# Altium footprint library WR-PHD_Socket Header_2.00mm.PcbLib: 62 footprints (part 2 of 4)
Each footprint in its own frame and in the unit in brackets; x right, y up, seen from the top. Pads: shape width x height; smd on the part's side, far side on the other; paste and mask are expansions set on the pad; w line width, h text height; cw(c..) or ccw(c..) is an arc to the next point about the centre after c.
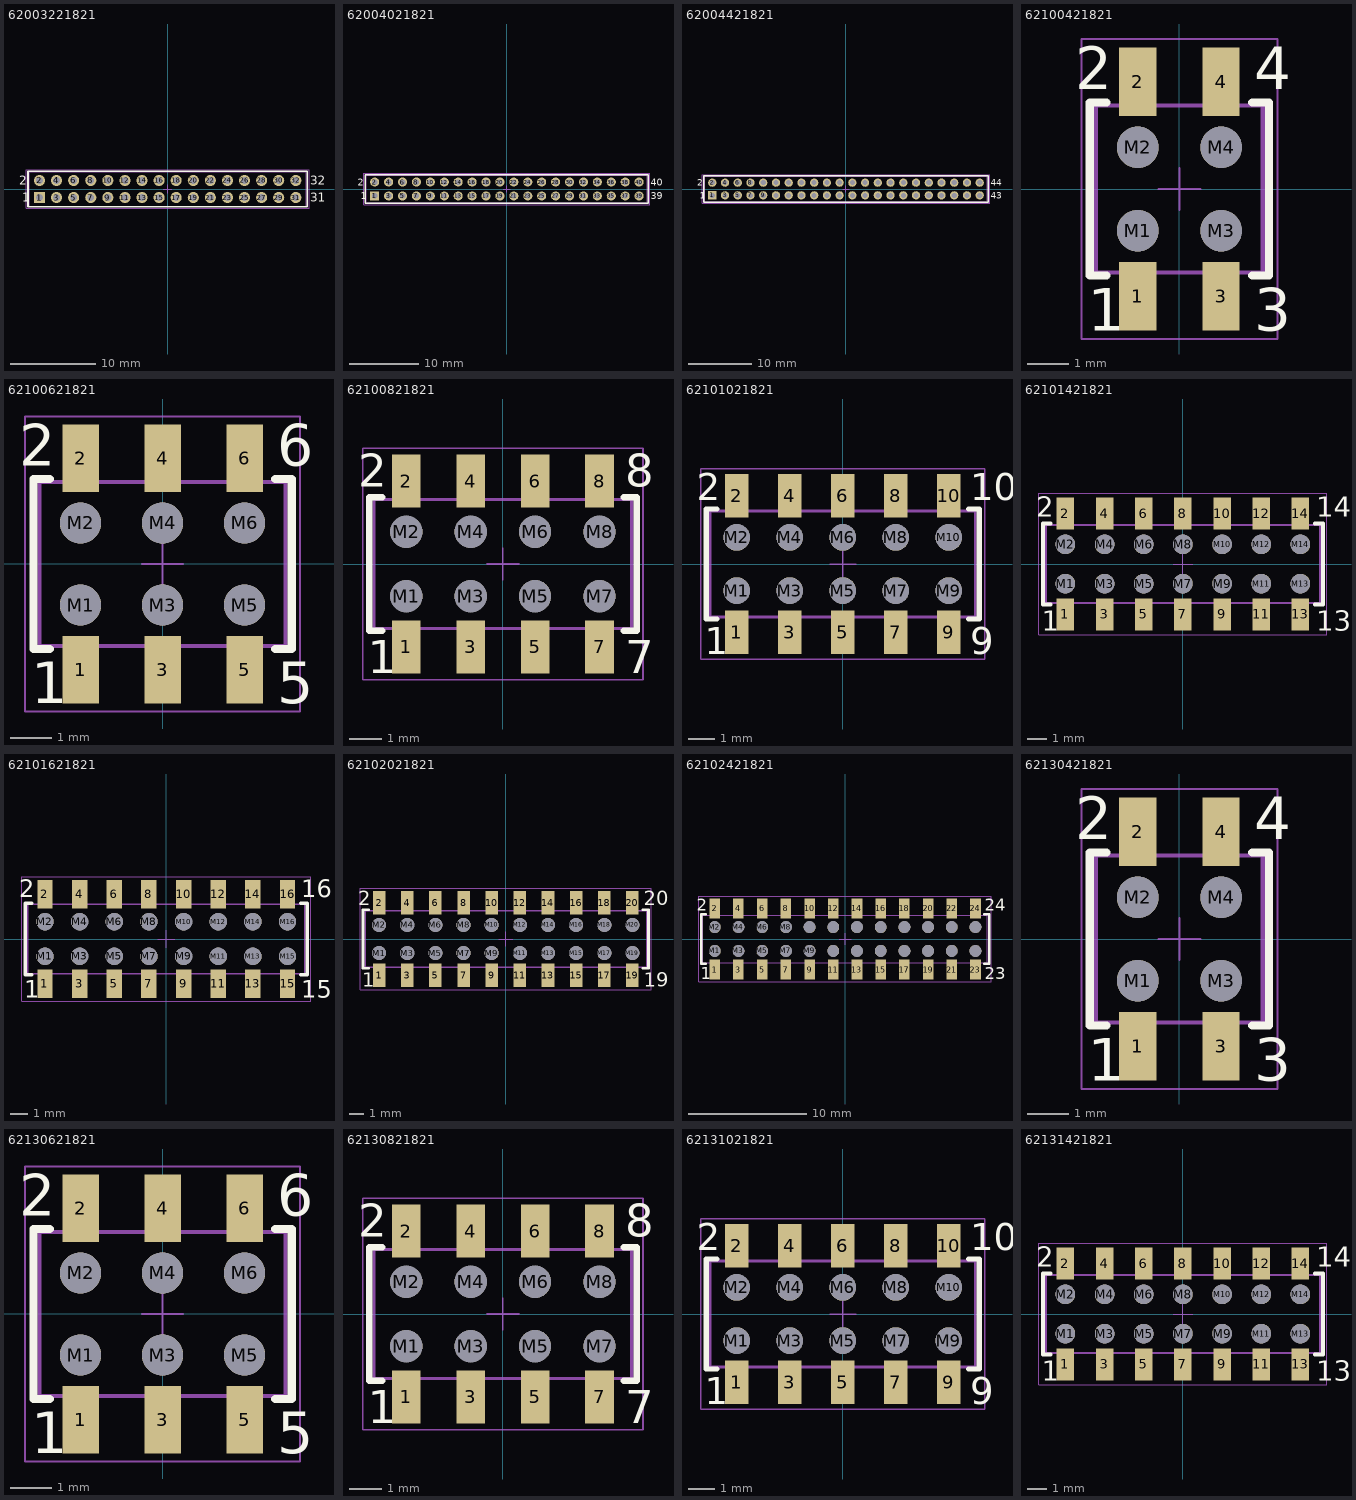
[diagram p1: the footprints below, top view; thin cyan lines are the x and y axes]

## 62003221821 [mm] "Socket Header, Pitch 2.00 mm, THT, Vertical, dual row, 32p"
height 4.45
pads (32):
  rect 1.3x1.3 hole 0.8: 1(-15,-1)
  round 1.3 hole 0.8: 2(-15,1) 3(-13,-1) 4(-13,1) 5(-11,-1) 6(-11,1) 7(-9,-1) 8(-9,1) 9(-7,-1) 10(-7,1) 11(-5,-1) 12(-5,1) 13(-3,-1) 14(-3,1) 15(-1,-1) 16(-1,1) 17(1,-1) 18(1,1) 19(3,-1) 20(3,1) 21(5,-1) 22(5,1) 23(7,-1) 24(7,1) 25(9,-1) 26(9,1) 27(11,-1) 28(11,1) 29(13,-1) 30(13,1) 31(15,-1) 32(15,1)
Top Overlay:
  lines w0.2: -16.35,-2.075 16.35,-2.075 16.35,2.075 -16.35,2.075 -16.35,-2.075
  text "32" at 16.7,0.5 h1.02
  text "31" at 16.7,-1.5 h1.02
  text "2" at -17.4,0.5 h1.02
  text "1" at -17,-1.5 h1.02
Mechanical 13:
  lines w0.1: -16.2,-2 16.2,-2 16.2,2 -16.2,2 -16.2,-2
Mechanical 15:
  lines w0.05: -0.5,0 0.5,0 ; 0,-0.5 0,0.5 ; -16.55,-2.275 16.55,-2.275 16.55,2.275 -16.55,2.275 -16.55,-2.275
3D body "62003221821.stp": height 4.35, standoff -2.65, extent -16.3,-2 16.3,2

## 62004021821 [mm] "Socket Header, Pitch 2.00 mm, THT, Vertical, dual row, 40p"
height 4.45
pads (40):
  rect 1.3x1.3 hole 0.8: 1(-19,-1)
  round 1.3 hole 0.8: 2(-19,1) 3(-17,-1) 4(-17,1) 5(-15,-1) 6(-15,1) 7(-13,-1) 8(-13,1) 9(-11,-1) 10(-11,1) 11(-9,-1) 12(-9,1) 13(-7,-1) 14(-7,1) 15(-5,-1) 16(-5,1) 17(-3,-1) 18(-3,1) 19(-1,-1) 20(-1,1) 21(1,-1) 22(1,1) 23(3,-1) 24(3,1) 25(5,-1) 26(5,1) 27(7,-1) 28(7,1) 29(9,-1) 30(9,1) 31(11,-1) 32(11,1) 33(13,-1) 34(13,1) 35(15,-1) 36(15,1) 37(17,-1) 38(17,1) 39(19,-1) 40(19,1)
Top Overlay:
  lines w0.2: -20.35,-2.075 -20.35,2.075 20.35,2.075 20.35,-2.075 -20.35,-2.075
  text "1" at -21,-1.5 h1.02
  text "2" at -21.4,0.5 h1.02
  text "39" at 20.7,-1.5 h1.02
  text "40" at 20.7,0.5 h1.02
Mechanical 13:
  lines w0.1: -20.2,-2 -20.2,2 20.2,2 20.2,-2 -20.2,-2
Mechanical 15:
  lines w0.05: -0.5,0 0.5,0 ; 0,-0.5 0,0.5 ; -20.55,-2.275 -20.55,2.275 20.55,2.275 20.55,-2.275 -20.55,-2.275
3D body "62004021821.stp": height 4.35, standoff -2.65, extent -20.3,-2 20.3,2

## 62004421821 [mm] "Socket Header, Pitch 2.00 mm, THT, Vertical, dual row, 44p"
height 4.45
pads (44):
  rect 1.3x1.3 hole 0.8: 1(-21,-1)
  round 1.3 hole 0.8: 2(-21,1) 3(-19,-1) 4(-19,1) 5(-17,-1) 6(-17,1) 7(-15,-1) 8(-15,1) 9(-13,-1) 10(-13,1) 11(-11,-1) 12(-11,1) 13(-9,-1) 14(-9,1) 15(-7,-1) 16(-7,1) 17(-5,-1) 18(-5,1) 19(-3,-1) 20(-3,1) 21(-1,-1) 22(-1,1) 23(1,-1) 24(1,1) 25(3,-1) 26(3,1) 27(5,-1) 28(5,1) 29(7,-1) 30(7,1) 31(9,-1) 32(9,1) 33(11,-1) 34(11,1) 35(13,-1) 36(13,1) 37(15,-1) 38(15,1) 39(17,-1) 40(17,1) 41(19,-1) 42(19,1) 43(21,-1) 44(21,1)
Top Overlay:
  lines w0.2: -22.35,-2.075 22.35,-2.075 22.35,2.075 -22.35,2.075 -22.35,-2.075
  text "2" at -23.4,0.5 h1.02
  text "1" at -23,-1.5 h1.02
  text "43" at 22.7,-1.5 h1.02
  text "44" at 22.7,0.5 h1.02
Mechanical 13:
  lines w0.1: -22.2,-2 22.2,-2 22.2,2 -22.2,2 -22.2,-2
Mechanical 15:
  lines w0.05: -0.5,0 0.5,0 ; 0,-0.5 0,0.5 ; -22.55,-2.275 22.55,-2.275 22.55,2.275 -22.55,2.275 -22.55,-2.275
3D body "62004421821.stp": height 4.35, standoff -2.65, extent -22.3,-2 22.3,2

## 62100421821 [mm] "Socket Header, Pitch 2.00 mm, SMT, Vertical, dual row, 4p"
height 2.35
pads (8):
  rect 0.89x1.65 smd: 1(-1,-2.575) 2(-1,2.575) 3(1,-2.575) 4(1,2.575)
  round 1 hole 1 unplated: M1(-1,-1) M2(-1,1) M3(1,-1) M4(1,1)
Top Overlay:
  lines w0.2: -1.75,-2.075 -2.15,-2.075 -2.15,2.075 -1.75,2.075 ; 1.75,-2.075 2.15,-2.075 2.15,2.075 1.75,2.075
  text "2" at -2.5,2.4 h1.02
  text "4" at 1.8,2.4 h1.02
  text "3" at 1.8,-3.4 h1.02
  text "1" at -2.2,-3.4 h1.02
Mechanical 13:
  lines w0.1: -1.25,-2 -1.25,-3 -0.75,-3 -0.75,-2 ; -1.25,2 -1.25,3 -0.75,3 -0.75,2 ; 0.75,-2 0.75,-3 1.25,-3 1.25,-2 ; 0.75,2 0.75,3 1.25,3 1.25,2 ; -2,-2 2,-2 2,2 -2,2 -2,-2
Mechanical 15:
  lines w0.05: -0.5,0 0.5,0 ; 0,-0.5 0,0.5 ; -2.35,-3.6 -2.35,3.6 2.35,3.6 2.35,-3.6 -2.35,-3.6
3D body "62100421821.stp": height 2.1, standoff 0, extent -2,-3 2,3

## 62100621821 [mm] "Socket Header, Pitch 2.00 mm, SMT, Vertical, dual row, 6p"
height 2.35
pads (12):
  rect 0.89x1.65 smd: 1(-2,-2.575) 2(-2,2.575) 3(0,-2.575) 4(0,2.575) 5(2,-2.575) 6(2,2.575)
  round 1 hole 1 unplated: M1(-2,-1) M2(-2,1) M3(0,-1) M4(0,1) M5(2,-1) M6(2,1)
Top Overlay:
  lines w0.2: -2.75,-2.075 -3.15,-2.075 -3.15,2.075 -2.75,2.075 ; 2.75,-2.075 3.15,-2.075 3.15,2.075 2.75,2.075
  text "2" at -3.5,2.4 h1.02
  text "1" at -3.2,-3.4 h1.02
  text "6" at 2.8,2.4 h1.02
  text "5" at 2.8,-3.4 h1.02
Mechanical 13:
  lines w0.1: -2.25,-2 -2.25,-3 -1.75,-3 -1.75,-2 ; -2.25,2 -2.25,3 -1.75,3 -1.75,2 ; -0.25,-2 -0.25,-3 0.25,-3 0.25,-2 ; -0.25,2 -0.25,3 0.25,3 0.25,2 ; 1.75,-2 1.75,-3 2.25,-3 2.25,-2 ; 1.75,2 1.75,3 2.25,3 2.25,2 ; -3,-2 3,-2 3,2 -3,2 -3,-2
Mechanical 15:
  lines w0.05: -0.5,0 0.5,0 ; 0,-0.5 0,0.5 ; -3.35,-3.6 -3.35,3.6 3.35,3.6 3.35,-3.6 -3.35,-3.6
3D body "62100621821.stp": height 2.1, standoff 0, extent -3,-3 3,3

## 62100821821 [mm] "Socket Header, Pitch 2.00 mm, SMT, Vertical, dual row, 8p"
height 2.35
pads (16):
  rect 0.89x1.65 smd: 1(-3,-2.575) 2(-3,2.575) 3(-1,-2.575) 4(-1,2.575) 5(1,-2.575) 6(1,2.575) 7(3,-2.575) 8(3,2.575)
  round 1 hole 1 unplated: M1(-3,-1) M2(-3,1) M3(-1,-1) M4(-1,1) M5(1,-1) M6(1,1) M7(3,-1) M8(3,1)
Top Overlay:
  lines w0.2: -3.75,-2.075 -4.15,-2.075 -4.15,2.075 -3.75,2.075 ; 3.75,-2.075 4.15,-2.075 4.15,2.075 3.75,2.075
  text "2" at -4.5,2.4 h1.02
  text "1" at -4.2,-3.4 h1.02
  text "8" at 3.8,2.4 h1.02
  text "7" at 3.8,-3.4 h1.02
Mechanical 13:
  lines w0.1: -3.25,-2 -3.25,-3 -2.75,-3 -2.75,-2 ; -3.25,2 -3.25,3 -2.75,3 -2.75,2 ; -1.25,-2 -1.25,-3 -0.75,-3 -0.75,-2 ; -1.25,2 -1.25,3 -0.75,3 -0.75,2 ; 0.75,-2 0.75,-3 1.25,-3 1.25,-2 ; 0.75,2 0.75,3 1.25,3 1.25,2 ; 2.75,-2 2.75,-3 3.25,-3 3.25,-2 ; 2.75,2 2.75,3 3.25,3 3.25,2 ; -4,-2 4,-2 4,2 -4,2 -4,-2
Mechanical 15:
  lines w0.05: -0.5,0 0.5,0 ; 0,-0.5 0,0.5 ; -4.35,-3.6 -4.35,3.6 4.35,3.6 4.35,-3.6 -4.35,-3.6
3D body "62100821821.stp": height 2.1, standoff 0, extent -4,-3 4,3

## 62101021821 [mm] "Socket Header, Pitch 2.00 mm, SMT, Vertical, dual row, 10p"
height 2.35
pads (20):
  rect 0.89x1.65 smd: 1(-4,-2.575) 2(-4,2.575) 3(-2,-2.575) 4(-2,2.575) 5(0,-2.575) 6(0,2.575) 7(2,-2.575) 8(2,2.575) 9(4,-2.575) 10(4,2.575)
  round 1 hole 1 unplated: M1(-4,-1) M2(-4,1) M3(-2,-1) M4(-2,1) M5(0,-1) M6(0,1) M7(2,-1) M8(2,1) M9(4,-1) M10(4,1)
Top Overlay:
  lines w0.2: -4.75,-2.075 -5.15,-2.075 -5.15,2.075 -4.75,2.075 ; 4.75,-2.075 5.15,-2.075 5.15,2.075 4.75,2.075
  text "2" at -5.5,2.4 h1.02
  text "1" at -5.2,-3.4 h1.02
  text "10" at 4.8,2.4 h1.02
  text "9" at 4.8,-3.4 h1.02
Mechanical 13:
  lines w0.1: -4.25,-2 -4.25,-3 -3.75,-3 -3.75,-2 ; -4.25,2 -4.25,3 -3.75,3 -3.75,2 ; -2.25,-2 -2.25,-3 -1.75,-3 -1.75,-2 ; -2.25,2 -2.25,3 -1.75,3 -1.75,2 ; -0.25,-2 -0.25,-3 0.25,-3 0.25,-2 ; -0.25,2 -0.25,3 0.25,3 0.25,2 ; 1.75,-2 1.75,-3 2.25,-3 2.25,-2 ; 1.75,2 1.75,3 2.25,3 2.25,2 ; 3.75,-2 3.75,-3 4.25,-3 4.25,-2 ; 3.75,2 3.75,3 4.25,3 4.25,2 ; -5,-2 5,-2 5,2 -5,2 -5,-2
Mechanical 15:
  lines w0.05: -0.5,0 0.5,0 ; 0,-0.5 0,0.5 ; -5.35,-3.6 -5.35,3.6 5.35,3.6 5.35,-3.6 -5.35,-3.6
3D body "62101021821.stp": height 2.1, standoff 0, extent -5,-3 5,3

## 62101421821 [mm] "Socket Header, Pitch 2.00 mm, SMT, Vertical, dual row, 14p"
height 2.35
pads (28):
  rect 0.89x1.65 smd: 1(-6,-2.575) 2(-6,2.575) 3(-4,-2.575) 4(-4,2.575) 5(-2,-2.575) 6(-2,2.575) 7(0,-2.575) 8(0,2.575) 9(2,-2.575) 10(2,2.575) 11(4,-2.575) 12(4,2.575) 13(6,-2.575) 14(6,2.575)
  round 1 hole 1 unplated: M1(-6,-1) M2(-6,1) M3(-4,-1) M4(-4,1) M5(-2,-1) M6(-2,1) M7(0,-1) M8(0,1) M9(2,-1) M10(2,1) M11(4,-1) M12(4,1) M13(6,-1) M14(6,1)
Top Overlay:
  lines w0.2: -6.75,-2.075 -7.15,-2.075 -7.15,2.075 -6.75,2.075 ; 6.75,-2.075 7.15,-2.075 7.15,2.075 6.75,2.075
  text "13" at 6.8,-3.4 h1.02
  text "14" at 6.8,2.4 h1.02
  text "2" at -7.5,2.4 h1.02
  text "1" at -7.2,-3.4 h1.02
Mechanical 13:
  lines w0.1: -6.25,-2 -6.25,-3 -5.75,-3 -5.75,-2 ; -6.25,2 -6.25,3 -5.75,3 -5.75,2 ; -4.25,-2 -4.25,-3 -3.75,-3 -3.75,-2 ; -4.25,2 -4.25,3 -3.75,3 -3.75,2 ; -2.25,-2 -2.25,-3 -1.75,-3 -1.75,-2 ; -2.25,2 -2.25,3 -1.75,3 -1.75,2 ; -0.25,-2 -0.25,-3 0.25,-3 0.25,-2 ; -0.25,2 -0.25,3 0.25,3 0.25,2 ; 1.75,-2 1.75,-3 2.25,-3 2.25,-2 ; 1.75,2 1.75,3 2.25,3 2.25,2 ; 3.75,-2 3.75,-3 4.25,-3 4.25,-2 ; 3.75,2 3.75,3 4.25,3 4.25,2 ; 5.75,-2 5.75,-3 6.25,-3 6.25,-2 ; 5.75,2 5.75,3 6.25,3 6.25,2 ; -7,-2 7,-2 7,2 -7,2 -7,-2
Mechanical 15:
  lines w0.05: -0.5,0 0.5,0 ; 0,-0.5 0,0.5 ; -7.35,-3.6 -7.35,3.6 7.35,3.6 7.35,-3.6 -7.35,-3.6
3D body "62101421821.stp": height 2.1, standoff 0, extent -7,-3 7,3

## 62101621821 [mm] "Socket Header, Pitch 2.00 mm, SMT, Vertical, dual row, 16p"
height 2.35
pads (32):
  rect 0.89x1.65 smd: 1(-7,-2.575) 2(-7,2.575) 3(-5,-2.575) 4(-5,2.575) 5(-3,-2.575) 6(-3,2.575) 7(-1,-2.575) 8(-1,2.575) 9(1,-2.575) 10(1,2.575) 11(3,-2.575) 12(3,2.575) 13(5,-2.575) 14(5,2.575) 15(7,-2.575) 16(7,2.575)
  round 1 hole 1 unplated: M1(-7,-1) M2(-7,1) M3(-5,-1) M4(-5,1) M5(-3,-1) M6(-3,1) M7(-1,-1) M8(-1,1) M9(1,-1) M10(1,1) M11(3,-1) M12(3,1) M13(5,-1) M14(5,1) M15(7,-1) M16(7,1)
Top Overlay:
  lines w0.2: -7.75,-2.075 -8.15,-2.075 -8.15,2.075 -7.75,2.075 ; 7.75,-2.075 8.15,-2.075 8.15,2.075 7.75,2.075
  text "1" at -8.2,-3.4 h1.02
  text "2" at -8.5,2.4 h1.02
  text "16" at 7.8,2.4 h1.02
  text "15" at 7.8,-3.4 h1.02
Mechanical 13:
  lines w0.1: -7.25,-2 -7.25,-3 -6.75,-3 -6.75,-2 ; -7.25,2 -7.25,3 -6.75,3 -6.75,2 ; -5.25,-2 -5.25,-3 -4.75,-3 -4.75,-2 ; -5.25,2 -5.25,3 -4.75,3 -4.75,2 ; -3.25,-2 -3.25,-3 -2.75,-3 -2.75,-2 ; -3.25,2 -3.25,3 -2.75,3 -2.75,2 ; -1.25,-2 -1.25,-3 -0.75,-3 -0.75,-2 ; -1.25,2 -1.25,3 -0.75,3 -0.75,2 ; 0.75,-2 0.75,-3 1.25,-3 1.25,-2 ; 0.75,2 0.75,3 1.25,3 1.25,2 ; 2.75,-2 2.75,-3 3.25,-3 3.25,-2 ; 2.75,2 2.75,3 3.25,3 3.25,2 ; 4.75,-2 4.75,-3 5.25,-3 5.25,-2 ; 4.75,2 4.75,3 5.25,3 5.25,2 ; 6.75,-2 6.75,-3 7.25,-3 7.25,-2 ; 6.75,2 6.75,3 7.25,3 7.25,2 ; -8,-2 -8,2 8,2 8,-2 -8,-2
Mechanical 15:
  lines w0.05: -0.5,0 0.5,0 ; 0,-0.5 0,0.5 ; -8.35,-3.6 8.35,-3.6 8.35,3.6 -8.35,3.6 -8.35,-3.6
3D body "62101621821.stp": height 2.1, standoff 0, extent -8,-3 8,3

## 62102021821 [mm] "Socket Header, Pitch 2.00 mm, SMT, Vertical, dual row, 20p"
height 2.35
pads (40):
  rect 0.89x1.65 smd: 1(-9,-2.575) 2(-9,2.575) 3(-7,-2.575) 4(-7,2.575) 5(-5,-2.575) 6(-5,2.575) 7(-3,-2.575) 8(-3,2.575) 9(-1,-2.575) 10(-1,2.575) 11(1,-2.575) 12(1,2.575) 13(3,-2.575) 14(3,2.575) 15(5,-2.575) 16(5,2.575) 17(7,-2.575) 18(7,2.575) 19(9,-2.575) 20(9,2.575)
  round 1 hole 1 unplated: M1(-9,-1) M2(-9,1) M3(-7,-1) M4(-7,1) M5(-5,-1) M6(-5,1) M7(-3,-1) M8(-3,1) M9(-1,-1) M10(-1,1) M11(1,-1) M12(1,1) M13(3,-1) M14(3,1) M15(5,-1) M16(5,1) M17(7,-1) M18(7,1) M19(9,-1) M20(9,1)
Top Overlay:
  lines w0.2: -9.75,-2.075 -10.15,-2.075 -10.15,2.075 -9.75,2.075 ; 9.75,-2.075 10.15,-2.075 10.15,2.075 9.75,2.075
  text "2" at -10.5,2.4 h1.02
  text "1" at -10.2,-3.4 h1.02
  text "20" at 9.8,2.4 h1.02
  text "19" at 9.8,-3.4 h1.02
Mechanical 13:
  lines w0.1: -9.25,-2 -9.25,-3 -8.75,-3 -8.75,-2 ; -9.25,2 -9.25,3 -8.75,3 -8.75,2 ; -7.25,-2 -7.25,-3 -6.75,-3 -6.75,-2 ; -7.25,2 -7.25,3 -6.75,3 -6.75,2 ; -5.25,-2 -5.25,-3 -4.75,-3 -4.75,-2 ; -5.25,2 -5.25,3 -4.75,3 -4.75,2 ; -3.25,-2 -3.25,-3 -2.75,-3 -2.75,-2 ; -3.25,2 -3.25,3 -2.75,3 -2.75,2 ; -1.25,-2 -1.25,-3 -0.75,-3 -0.75,-2 ; -1.25,2 -1.25,3 -0.75,3 -0.75,2 ; 0.75,-2 0.75,-3 1.25,-3 1.25,-2 ; 0.75,2 0.75,3 1.25,3 1.25,2 ; 2.75,-2 2.75,-3 3.25,-3 3.25,-2 ; 2.75,2 2.75,3 3.25,3 3.25,2 ; 4.75,-2 4.75,-3 5.25,-3 5.25,-2 ; 4.75,2 4.75,3 5.25,3 5.25,2 ; 6.75,-2 6.75,-3 7.25,-3 7.25,-2 ; 6.75,2 6.75,3 7.25,3 7.25,2 ; 8.75,-2 8.75,-3 9.25,-3 9.25,-2 ; 8.75,2 8.75,3 9.25,3 9.25,2 ; -10,-2 10,-2 10,2 -10,2 -10,-2
Mechanical 15:
  lines w0.05: -0.5,0 0.5,0 ; 0,-0.5 0,0.5 ; -10.35,-3.6 -10.35,3.6 10.35,3.6 10.35,-3.6 -10.35,-3.6
3D body "62102021821.stp": height 2.1, standoff 0, extent -10,-3 10,3

## 62102421821 [mm] "Socket Header, Pitch 2.00 mm, SMT, Vertical, dual row, 24p"
height 2.35
pads (48):
  rect 0.89x1.65 smd: 1(-11,-2.575) 2(-11,2.575) 3(-9,-2.575) 4(-9,2.575) 5(-7,-2.575) 6(-7,2.575) 7(-5,-2.575) 8(-5,2.575) 9(-3,-2.575) 10(-3,2.575) 11(-1,-2.575) 12(-1,2.575) 13(1,-2.575) 14(1,2.575) 15(3,-2.575) 16(3,2.575) 17(5,-2.575) 18(5,2.575) 19(7,-2.575) 20(7,2.575) 21(9,-2.575) 22(9,2.575) 23(11,-2.575) 24(11,2.575)
  round 1 hole 1 unplated: M1(-11,-1) M2(-11,1) M3(-9,-1) M4(-9,1) M5(-7,-1) M6(-7,1) M7(-5,-1) M8(-5,1) M9(-3,-1) M10(-3,1) M11(-1,-1) M12(-1,1) M13(1,-1) M14(1,1) M15(3,-1) M16(3,1) M17(5,-1) M18(5,1) M19(7,-1) M20(7,1) M21(9,-1) M22(9,1) M23(11,-1) M24(11,1)
Top Overlay:
  lines w0.2: -11.75,-2.075 -12.15,-2.075 -12.15,2.075 -11.75,2.075 ; 11.75,-2.075 12.15,-2.075 12.15,2.075 11.75,2.075
  text "2" at -12.5,2.4 h1.02
  text "1" at -12.2,-3.4 h1.02
  text "24" at 11.8,2.4 h1.02
  text "23" at 11.8,-3.4 h1.02
Mechanical 13:
  lines w0.1: -11.25,-2 -11.25,-3 -10.75,-3 -10.75,-2 ; -11.25,2 -11.25,3 -10.75,3 -10.75,2 ; -9.25,-2 -9.25,-3 -8.75,-3 -8.75,-2 ; -9.25,2 -9.25,3 -8.75,3 -8.75,2 ; -7.25,-2 -7.25,-3 -6.75,-3 -6.75,-2 ; -7.25,2 -7.25,3 -6.75,3 -6.75,2 ; -5.25,-2 -5.25,-3 -4.75,-3 -4.75,-2 ; -5.25,2 -5.25,3 -4.75,3 -4.75,2 ; -3.25,-2 -3.25,-3 -2.75,-3 -2.75,-2 ; -3.25,2 -3.25,3 -2.75,3 -2.75,2 ; -1.25,-2 -1.25,-3 -0.75,-3 -0.75,-2 ; -1.25,2 -1.25,3 -0.75,3 -0.75,2 ; 0.75,-2 0.75,-3 1.25,-3 1.25,-2 ; 0.75,2 0.75,3 1.25,3 1.25,2 ; 2.75,-2 2.75,-3 3.25,-3 3.25,-2 ; 2.75,2 2.75,3 3.25,3 3.25,2 ; 4.75,-2 4.75,-3 5.25,-3 5.25,-2 ; 4.75,2 4.75,3 5.25,3 5.25,2 ; 6.75,-2 6.75,-3 7.25,-3 7.25,-2 ; 6.75,2 6.75,3 7.25,3 7.25,2 ; 8.75,-2 8.75,-3 9.25,-3 9.25,-2 ; 8.75,2 8.75,3 9.25,3 9.25,2 ; 10.75,-2 10.75,-3 11.25,-3 11.25,-2 ; 10.75,2 10.75,3 11.25,3 11.25,2 ; -12,-2 12,-2 12,2 -12,2 -12,-2
Mechanical 15:
  lines w0.05: -0.5,0 0.5,0 ; 0,-0.5 0,0.5 ; -12.35,-3.6 -12.35,3.6 12.35,3.6 12.35,-3.6 -12.35,-3.6
3D body "62102421821.stp": height 2.1, standoff 0, extent -12,-3 12,3

## 62130421821 [mm] "Socket Header, Pitch 2.00 mm, SMT, Vertical, dual row, 4p"
height 2.35
pads (8):
  rect 0.89x1.65 smd: 1(-1,-2.575) 2(-1,2.575) 3(1,-2.575) 4(1,2.575)
  round 1 hole 1 unplated: M1(-1,-1) M2(-1,1) M3(1,-1) M4(1,1)
Top Overlay:
  lines w0.2: -1.75,-2.075 -2.15,-2.075 -2.15,2.075 -1.75,2.075 ; 1.75,-2.075 2.15,-2.075 2.15,2.075 1.75,2.075
  text "2" at -2.5,2.4 h1.02
  text "4" at 1.8,2.4 h1.02
  text "3" at 1.8,-3.4 h1.02
  text "1" at -2.2,-3.4 h1.02
Mechanical 13:
  lines w0.1: -1.25,-2 -1.25,-3 -0.75,-3 -0.75,-2 ; -1.25,2 -1.25,3 -0.75,3 -0.75,2 ; 0.75,-2 0.75,-3 1.25,-3 1.25,-2 ; 0.75,2 0.75,3 1.25,3 1.25,2 ; -2,-2 2,-2 2,2 -2,2 -2,-2
Mechanical 15:
  lines w0.05: -0.5,0 0.5,0 ; 0,-0.5 0,0.5 ; -2.35,-3.6 -2.35,3.6 2.35,3.6 2.35,-3.6 -2.35,-3.6
3D body "62130421821.stp": height 2.95, standoff 0, extent -2,-3 2,3

## 62130621821 [mm] "Socket Header, Pitch 2.00 mm, SMT, Vertical, dual row, 6p"
height 2.35
pads (12):
  rect 0.89x1.65 smd: 1(-2,-2.575) 2(-2,2.575) 3(0,-2.575) 4(0,2.575) 5(2,-2.575) 6(2,2.575)
  round 1 hole 1 unplated: M1(-2,-1) M2(-2,1) M3(0,-1) M4(0,1) M5(2,-1) M6(2,1)
Top Overlay:
  lines w0.2: -2.75,-2.075 -3.15,-2.075 -3.15,2.075 -2.75,2.075 ; 2.75,-2.075 3.15,-2.075 3.15,2.075 2.75,2.075
  text "6" at 2.8,2.4 h1.02
  text "5" at 2.8,-3.4 h1.02
  text "2" at -3.5,2.4 h1.02
  text "1" at -3.2,-3.4 h1.02
Mechanical 13:
  lines w0.1: -2.25,-2 -2.25,-3 -1.75,-3 -1.75,-2 ; -2.25,2 -2.25,3 -1.75,3 -1.75,2 ; -0.25,-2 -0.25,-3 0.25,-3 0.25,-2 ; -0.25,2 -0.25,3 0.25,3 0.25,2 ; 1.75,-2 1.75,-3 2.25,-3 2.25,-2 ; 1.75,2 1.75,3 2.25,3 2.25,2 ; -3,-2 3,-2 3,2 -3,2 -3,-2
Mechanical 15:
  lines w0.05: -0.5,0 0.5,0 ; 0,-0.5 0,0.5 ; -3.35,-3.6 -3.35,3.6 3.35,3.6 3.35,-3.6 -3.35,-3.6
3D body "62130621821.stp": height 2.95, standoff 0, extent -3,-3 3,3

## 62130821821 [mm] "Socket Header, Pitch 2.00 mm, SMT, Vertical, dual row, 8p"
height 2.35
pads (16):
  rect 0.89x1.65 smd: 1(-3,-2.575) 2(-3,2.575) 3(-1,-2.575) 4(-1,2.575) 5(1,-2.575) 6(1,2.575) 7(3,-2.575) 8(3,2.575)
  round 1 hole 1 unplated: M1(-3,-1) M2(-3,1) M3(-1,-1) M4(-1,1) M5(1,-1) M6(1,1) M7(3,-1) M8(3,1)
Top Overlay:
  lines w0.2: -3.75,-2.075 -4.15,-2.075 -4.15,2.075 -3.75,2.075 ; 3.75,-2.075 4.15,-2.075 4.15,2.075 3.75,2.075
  text "8" at 3.8,2.4 h1.02
  text "7" at 3.8,-3.4 h1.02
  text "1" at -4.2,-3.4 h1.02
  text "2" at -4.5,2.4 h1.02
Mechanical 13:
  lines w0.1: -3.25,-2 -3.25,-3 -2.75,-3 -2.75,-2 ; -3.25,2 -3.25,3 -2.75,3 -2.75,2 ; -1.25,-2 -1.25,-3 -0.75,-3 -0.75,-2 ; -1.25,2 -1.25,3 -0.75,3 -0.75,2 ; 0.75,-2 0.75,-3 1.25,-3 1.25,-2 ; 0.75,2 0.75,3 1.25,3 1.25,2 ; 2.75,-2 2.75,-3 3.25,-3 3.25,-2 ; 2.75,2 2.75,3 3.25,3 3.25,2 ; -4,-2 -4,2 4,2 4,-2 -4,-2
Mechanical 15:
  lines w0.05: -0.5,0 0.5,0 ; 0,-0.5 0,0.5 ; -4.35,-3.6 4.35,-3.6 4.35,3.6 -4.35,3.6 -4.35,-3.6
3D body "62130821821.stp": height 2.95, standoff 0, extent -4,-3 4,3

## 62131021821 [mm] "Socket Header, Pitch 2.00 mm, SMT, Vertical, dual row, 10p"
height 2.35
pads (20):
  rect 0.89x1.65 smd: 1(-4,-2.575) 2(-4,2.575) 3(-2,-2.575) 4(-2,2.575) 5(0,-2.575) 6(0,2.575) 7(2,-2.575) 8(2,2.575) 9(4,-2.575) 10(4,2.575)
  round 1 hole 1 unplated: M1(-4,-1) M2(-4,1) M3(-2,-1) M4(-2,1) M5(0,-1) M6(0,1) M7(2,-1) M8(2,1) M9(4,-1) M10(4,1)
Top Overlay:
  lines w0.2: -4.75,-2.075 -5.15,-2.075 -5.15,2.075 -4.75,2.075 ; 4.75,-2.075 5.15,-2.075 5.15,2.075 4.75,2.075
  text "10" at 4.8,2.4 h1.02
  text "9" at 4.8,-3.4 h1.02
  text "2" at -5.5,2.4 h1.02
  text "1" at -5.2,-3.4 h1.02
Mechanical 13:
  lines w0.1: -4.25,-2 -4.25,-3 -3.75,-3 -3.75,-2 ; -4.25,2 -4.25,3 -3.75,3 -3.75,2 ; -2.25,-2 -2.25,-3 -1.75,-3 -1.75,-2 ; -2.25,2 -2.25,3 -1.75,3 -1.75,2 ; -0.25,-2 -0.25,-3 0.25,-3 0.25,-2 ; -0.25,2 -0.25,3 0.25,3 0.25,2 ; 1.75,-2 1.75,-3 2.25,-3 2.25,-2 ; 1.75,2 1.75,3 2.25,3 2.25,2 ; 3.75,-2 3.75,-3 4.25,-3 4.25,-2 ; 3.75,2 3.75,3 4.25,3 4.25,2 ; -5,-2 5,-2 5,2 -5,2 -5,-2
Mechanical 15:
  lines w0.05: -0.5,0 0.5,0 ; 0,-0.5 0,0.5 ; -5.35,-3.6 -5.35,3.6 5.35,3.6 5.35,-3.6 -5.35,-3.6
3D body "62131021821.stp": height 2.95, standoff 0, extent -5,-3 5,3

## 62131421821 [mm] "Socket Header, Pitch 2.00 mm, SMT, Vertical, dual row, 14p"
height 2.35
pads (28):
  rect 0.89x1.65 smd: 1(-6,-2.575) 2(-6,2.575) 3(-4,-2.575) 4(-4,2.575) 5(-2,-2.575) 6(-2,2.575) 7(0,-2.575) 8(0,2.575) 9(2,-2.575) 10(2,2.575) 11(4,-2.575) 12(4,2.575) 13(6,-2.575) 14(6,2.575)
  round 1 hole 1 unplated: M1(-6,-1) M2(-6,1) M3(-4,-1) M4(-4,1) M5(-2,-1) M6(-2,1) M7(0,-1) M8(0,1) M9(2,-1) M10(2,1) M11(4,-1) M12(4,1) M13(6,-1) M14(6,1)
Top Overlay:
  lines w0.2: -6.75,-2.075 -7.15,-2.075 -7.15,2.075 -6.75,2.075 ; 6.75,-2.075 7.15,-2.075 7.15,2.075 6.75,2.075
  text "14" at 6.8,2.4 h1.02
  text "13" at 6.8,-3.4 h1.02
  text "2" at -7.5,2.4 h1.02
  text "1" at -7.2,-3.4 h1.02
Mechanical 13:
  lines w0.1: -6.25,-2 -6.25,-3 -5.75,-3 -5.75,-2 ; -6.25,2 -6.25,3 -5.75,3 -5.75,2 ; -4.25,-2 -4.25,-3 -3.75,-3 -3.75,-2 ; -4.25,2 -4.25,3 -3.75,3 -3.75,2 ; -2.25,-2 -2.25,-3 -1.75,-3 -1.75,-2 ; -2.25,2 -2.25,3 -1.75,3 -1.75,2 ; -0.25,-2 -0.25,-3 0.25,-3 0.25,-2 ; -0.25,2 -0.25,3 0.25,3 0.25,2 ; 1.75,-2 1.75,-3 2.25,-3 2.25,-2 ; 1.75,2 1.75,3 2.25,3 2.25,2 ; 3.75,-2 3.75,-3 4.25,-3 4.25,-2 ; 3.75,2 3.75,3 4.25,3 4.25,2 ; 5.75,-2 5.75,-3 6.25,-3 6.25,-2 ; 5.75,2 5.75,3 6.25,3 6.25,2 ; -7,-2 7,-2 7,2 -7,2 -7,-2
Mechanical 15:
  lines w0.05: -0.5,0 0.5,0 ; 0,-0.5 0,0.5 ; -7.35,-3.6 -7.35,3.6 7.35,3.6 7.35,-3.6 -7.35,-3.6
3D body "62131421821.stp": height 2.95, standoff 0, extent -7,-3 7,3